# Altium schematic symbol library ABP2DANT100PG2A3XX.SchLib: 1 symbol
Pins are listed as number, name and electrical type; pins without a type are passive.

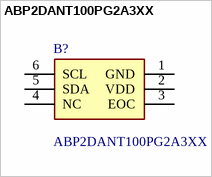
[diagram p0: symbol ABP2DANT100PG2A3XX]

## ABP2DANT100PG2A3XX
designator B?
Pressure Sensor 100PSI (689.48kPa) Gauge Male - 0.11" (2.79mm) Tube 14 b 6-DIP (0.453", 11.50mm), Top Port; Manufacturer_Name: Honeywell; Geometry.Height: 14.4mm; Mouser Part Number: 785-P2DANT100PG2A3XX; Mouser Price/Stock: https://www.mouser.co.uk/ProductDetail/Honeywell/ABP2DANT100PG2A3XX?qs=iLbezkQI%252BsjuQframA4BWQ%3D%3D; Manufacturer_Part_Number: ABP2DANT100PG2A3XX; Datasheet Link: https://prod-edam.honeywell.com/content/dam/honeywell-edam/sps/siot/en-us/products/sensors/pressure-sensors/board-mount-pressure-sensors/basic-abp2-series/documents/sps-siot-abp2-series-datasheet-32350268-en.pdf?download=false
footprint ABP2DANT100PG2A3XX
pins: 1 GND, 2 VDD, 3 EOC, 4 NC, 5 SDA, 6 SCL